# Altium footprint library Diode.PcbLib: 23 footprints (part 2 of 2)
Each footprint in its own frame and in the unit in brackets; x right, y up, seen from the top. Pads: shape width x height; smd on the part's side, far side on the other; paste and mask are expansions set on the pad; w line width, h text height; cw(c..) or ccw(c..) is an arc to the next point about the centre after c.
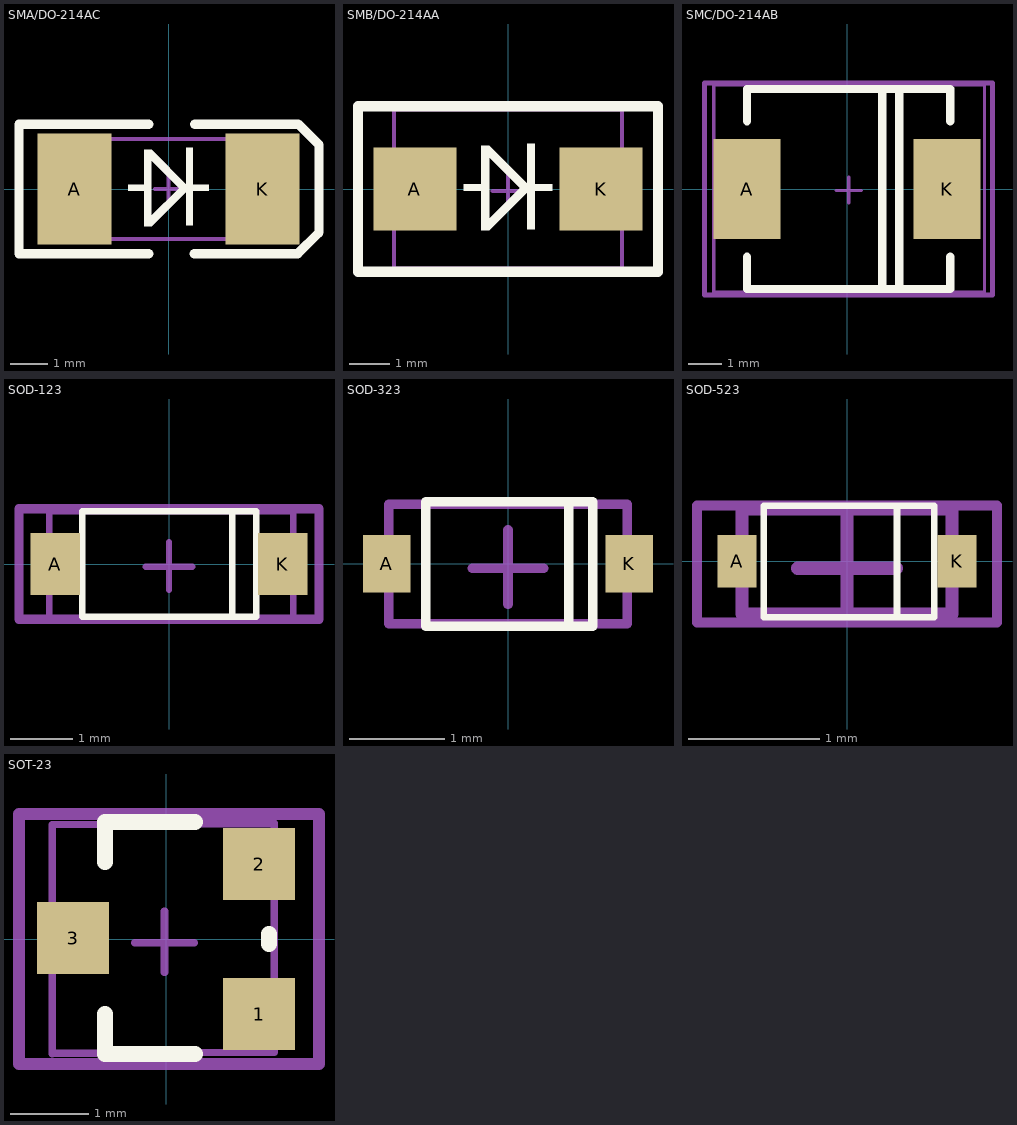
[diagram p1: the footprints below, top view; thin cyan lines are the x and y axes]

## SMA/DO-214AC [mm] "塑封二极管"
pads (2):
  rect 2x3 smd: A(-2.54,0) K(2.54,0)
Top Overlay:
  region: 1.092,-0.051 1.092,0.127 0.61,0.127 0.61,-0.051
  region: 0.395,-0.091 0.548,0.062 -0.457,1.067 -0.61,0.914
  region: -0.635,-0.051 -0.635,0.127 -1.092,0.127 -1.092,-0.051
  rectangle: 0.47,-0.991 0.66,1.118
  rectangle: -0.66,-1.016 -0.457,1.067
  region: 0.549,-0.012 0.396,0.141 -0.609,-0.864 -0.456,-1.017
  lines w0.254: -0.54,-1.75 -4.04,-1.75 -4.04,1.75 -0.54,1.75 ; 0.69,-1.753 0.692,-1.75 3.255,-1.75 3.486,-1.75 4.043,-1.194 4.064,-1.172 4.064,1.194 3.508,1.75 3.277,1.75 0.714,1.75 0.711,1.753
Top Component Outline:
  lines w0.1: -2.3,-1.35 -2.3,1.35 2.3,1.35 2.3,-1.35 -2.3,-1.35
Top Component Center:
  lines w0.1: -0.375,0 0.375,0 ; 0,-0.375 0,0.4
Top Value:
  text "'.Comment'" at -2.476,-0.342 h1.14
Top Designator:
  text "'.Designator'" at -3.642,-0.495 h1.27
3D body "DO-214AC.STEP": height 2.4, standoff 0, extent -2.3,-1.35 2.3,1.35

## SMB/DO-214AA [mil] "塑封二极管"
pads (2):
  rect 80x80 smd: A(-90,0) K(90,0)
Top Overlay:
  region: 21.61,-0.46 15.61,5.55 -23.97,-34.03 -17.96,-40.04
  rectangle: -26,-40 -18,42
  rectangle: 18.5,-39 26,44
  region: -25,-2 -25,5 -43,5 -43,-2
  region: 15.57,-3.58 21.58,2.42 -18,42 -24.01,35.99
  region: 43,-2 43,5 24,5 24,-2
  lines w10: -145,-80 145,-80 145,80 -145,80 -145,-80
Top Component Outline:
  lines w3.94: -110.24,-76.77 -110.24,76.77 110.24,76.77 110.24,-76.77 -110.24,-76.77
Top Component Center:
  lines w3.94: -14.77,-1.78 14.76,-1.78 ; 0,-16.54 0,13.97
Top Value:
  text "'.Comment'" at -97.48,-15.23 h45
Top Designator:
  text "'.Designator'" at -143.4,-21.26 h50
3D body "DO-214AA.STEP": height 98.43, standoff 0, extent -110.23,-76.77 110.24,76.77

## SMC/DO-214AB [mm] "塑封二极管"
pads (2):
  rect 2x3 smd: A(-3,0) K(3,0)
Top Overlay:
  lines w0.254: -3,-2.032 -3,-3 3.096,-3 3.096,-2.032 ; -3,2.032 -3,3 3.096,3 3.096,2.032 ; 1.064,-3 1.064,3 ; 1.572,-3 1.572,3
Top Component Outline:
  lines w0.1: -4,-3.1 4.125,-3.1 4.125,3.125 -4,3.125 -4,-3.1
Top Component Center:
  lines w0.1: -0.327,-0.045 0.423,-0.045 ; 0.048,-0.42 0.048,0.355
Top Value:
  text "'.Comment'" at -2.428,-0.387 h1.14
Top Designator:
  text "'.Designator'" at -3.594,-0.54 h1.27
Top Designator (Mech15):
  lines w0.152: -4.27,-3.175 -4.27,3.175 4.366,3.175 4.366,-3.175 -4.27,-3.175
  text "'.Designator'" at -3,-0.635 h1.02
3D body "DO-214AB.STEP": height 2.7, standoff 0, extent -4.035,-3.05 4.085,3.15

## SOD-123 [mm] "塑封二极管"
pads (2):
  rect 0.8x1 smd: A(-1.829,0) K(1.829,0)
Top Overlay:
  lines w0.1: 1.016,-0.85 1.016,0.85 ; -1.397,-0.85 1.403,-0.85 1.403,0.85 -1.397,0.85 -1.397,-0.85
Top Component Outline:
  lines w0.1: -1.925,-0.875 -1.925,0.85 2,0.85 2,-0.875 -1.925,-0.875
Top Component Center:
  lines w0.1: -0.375,-0.045 0.375,-0.045 ; 0,-0.42 0,0.355
Top Value:
  text "'.Comment'" at -2.202,-0.304 h1.02
Top Designator:
  text "'.Designator'" at -3.28,-0.446 h1.14
Top Designator (Mech15):
  lines w0.152: -2.413,-0.889 2.413,-0.889 2.413,0.889 -2.413,0.889 -2.413,-0.889
  text "'.Designator'" at -2.159,-0.381 h0.76
3D body "SOD-123_DiodesInc.STEP": height 1.43, standoff -0.02, extent -1.9,-0.889 1.95,0.811

## SOD-323 [mm] "塑封二极管"
pads (2):
  rect 0.5x0.6 smd: A(-1.27,0) K(1.27,0)
Top Overlay:
  lines w0.1: 0.635,-0.651 0.635,0.649 ; -0.861,-0.651 -0.861,0.649 0.889,0.649 0.889,-0.649 0.887,-0.651 -0.861,-0.651
Top Component Outline:
  lines w0.1: -1.25,-0.625 -1.25,0.625 1.25,0.625 1.25,-0.625 -1.25,-0.625
Top Component Center:
  lines w0.1: -0.375,-0.045 0.375,-0.045 ; 0,-0.42 0,0.355
Top Value:
  text "'.Comment'" at -1.928,-0.266 h0.89
Top Designator:
  text "'.Designator'" at -2.917,-0.371 h1.02
3D body "SOD323.STEP": height 0.9, standoff -0.09, extent -1.25,-0.635 1.25,0.615

## SOD-523 [mm] "塑封二极管"
pads (2):
  rect 0.3x0.4 smd: A(-0.838,0) K(0.838,0)
Top Overlay:
  lines w0.05: 0.381,-0.425 0.381,0.425 ; -0.635,-0.425 -0.635,0.425 0.665,0.425 0.665,-0.425 -0.635,-0.425
Top Component Outline:
  lines w0.1: -0.8,-0.4 -0.8,0.4 0.8,0.4 0.8,-0.4 -0.8,-0.4
Top Component Center:
  lines w0.1: -0.375,-0.052 0.375,-0.052 ; 0,-0.427 0,0.348
Top Value:
  text "'.Comment'" at -1.369,-0.189 h0.64
Top Designator:
  text "'.Designator'" at -2.176,-0.296 h0.76
Top Designator (Mech15):
  lines w0.076: -1.143,-0.464 -1.143,0.425 1.143,0.425 1.143,-0.464 -1.143,-0.464
  text "'.Designator'" at -2.032,-0.337 h0.76
3D body "SOD-523.STEP": height 0.65, standoff 0, extent -0.8,-0.4 0.8,0.4

## SOT-23 [mil]
pads (3):
  rrect0% 36x36 smd: 1(46.5,-37.5) 2(46.5,37.5) 3(-46.5,0.5)
Top Overlay:
  lines w8: -30.5,-37.5 -30.5,-57.5 14.5,-57.5 ; -30.5,38.5 -30.5,58.5 14.5,58.5 ; 51.5,-2.5 51.5,2.5
Top Component Outline:
  lines w3.94: -56.85,-57.3 54.13,-56.64 54.13,57.79 -56.85,57.13 -56.85,-57.3
Top Component Center:
  lines w3.94: -15.52,-1.88 14.01,-1.88 ; -0.75,-16.64 -0.75,13.87
Top Value:
  text "'.Comment'" at -64.67,-7.94 h30
Top Designator:
  text "'.Designator'" at -100.56,-13.66 h35
Top Designator (Mech15):
  lines w6: -73.5,-62.5 -73.5,62.5 76.5,62.5 76.5,-62.5 -73.5,-62.5
  text "'.Designator'" at -83.5,-12.5 h30
3D body "SOT-23-3.STEP": height 47.24, standoff 0, extent -56.1,-57.08 54.13,57.09